# Altium footprint library imports.PcbLib: 1 footprints
Each footprint in its own frame and in the unit in brackets; x right, y up, seen from the top. Pads: shape width x height; smd on the part's side, far side on the other; paste and mask are expansions set on the pad; w line width, h text height; cw(c..) or ccw(c..) is an arc to the next point about the centre after c.
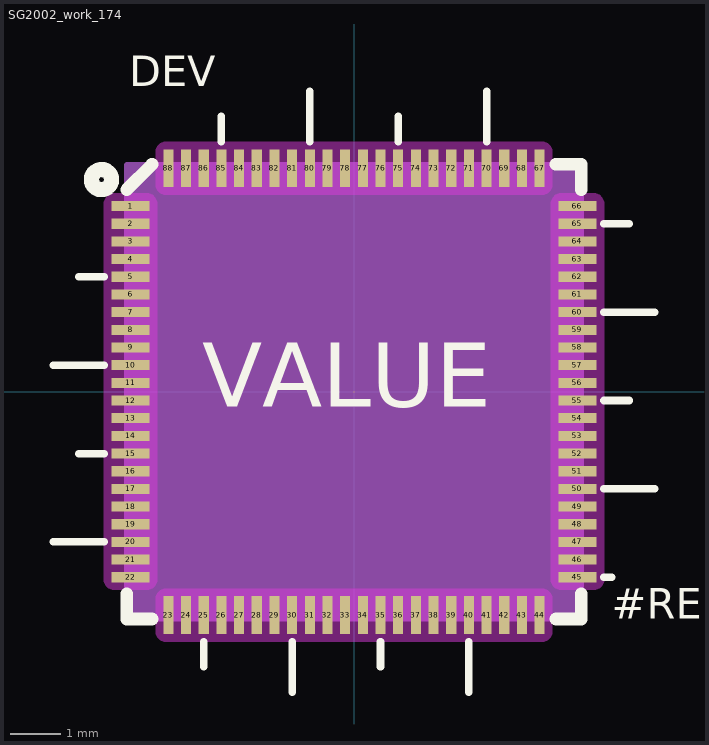
[diagram p0: the footprint, top view; thin cyan lines are the x and y axes]

## SG2002_work_174 [mm]
pads (89):
  rect 0.75x0.2 smd: 1(-4.425,3.675) 2(-4.425,3.325) 3(-4.425,2.975) 4(-4.425,2.625) 5(-4.425,2.275) 6(-4.425,1.925) 7(-4.425,1.575) 8(-4.425,1.225) 9(-4.425,0.875) 10(-4.425,0.525) 11(-4.425,0.175) 12(-4.425,-0.175) 13(-4.425,-0.525) 14(-4.425,-0.875) 15(-4.425,-1.225) 16(-4.425,-1.575) 17(-4.425,-1.925) 18(-4.425,-2.275) 19(-4.425,-2.625) 20(-4.425,-2.975) 21(-4.425,-3.325) 22(-4.425,-3.675) 45(4.425,-3.675) 46(4.425,-3.325) 47(4.425,-2.975) 48(4.425,-2.625) 49(4.425,-2.275) 50(4.425,-1.925) 51(4.425,-1.575) 52(4.425,-1.225) 53(4.425,-0.875) 54(4.425,-0.525) 55(4.425,-0.175) 56(4.425,0.175) 57(4.425,0.525) 58(4.425,0.875) 59(4.425,1.225) 60(4.425,1.575) 61(4.425,1.925) 62(4.425,2.275) 63(4.425,2.625) 64(4.425,2.975) 65(4.425,3.325) 66(4.425,3.675)
  rect 0.2x0.75 smd: 23(-3.675,-4.425) 24(-3.325,-4.425) 25(-2.975,-4.425) 26(-2.625,-4.425) 27(-2.275,-4.425) 28(-1.925,-4.425) 29(-1.575,-4.425) 30(-1.225,-4.425) 31(-0.875,-4.425) 32(-0.525,-4.425) 33(-0.175,-4.425) 34(0.175,-4.425) 35(0.525,-4.425) 36(0.875,-4.425) 37(1.225,-4.425) 38(1.575,-4.425) 39(1.925,-4.425) 40(2.275,-4.425) 41(2.625,-4.425) 42(2.975,-4.425) 43(3.325,-4.425) 44(3.675,-4.425) 67(3.675,4.425) 68(3.325,4.425) 69(2.975,4.425) 70(2.625,4.425) 71(2.275,4.425) 72(1.925,4.425) 73(1.575,4.425) 74(1.225,4.425) 75(0.875,4.425) 76(0.525,4.425) 77(0.175,4.425) 78(-0.175,4.425) 79(-0.525,4.425) 80(-0.875,4.425) 81(-1.225,4.425) 82(-1.575,4.425) 83(-1.925,4.425) 84(-2.275,4.425) 85(-2.625,4.425) 86(-2.975,4.425) 87(-3.325,4.425) 88(-3.675,4.425)
  rect 0x0 smd: 89(0,0)
TOP keep-out:
  region: 3.725,-4.95 3.765,-4.95 3.838,-4.92 3.895,-4.863 3.925,-4.79 3.925,-4.75 3.925,-4.1 3.925,-4.06 3.895,-3.987 3.838,-3.93 3.765,-3.9 3.725,-3.9 -3.725,-3.9 -3.765,-3.9 -3.838,-3.93 -3.895,-3.987 -3.925,-4.06 -3.925,-4.1 -3.925,-4.75 -3.925,-4.79 -3.895,-4.863 -3.838,-4.92 -3.765,-4.95 -3.725,-4.95
  region: -3.725,4.95 -3.765,4.95 -3.838,4.92 -3.895,4.863 -3.925,4.79 -3.925,4.75 -3.925,4.1 -3.925,4.06 -3.895,3.987 -3.838,3.93 -3.765,3.9 -3.725,3.9 3.725,3.9 3.765,3.9 3.838,3.93 3.895,3.987 3.925,4.06 3.925,4.1 3.925,4.75 3.925,4.79 3.895,4.863 3.838,4.92 3.765,4.95 3.725,4.95
  region: 4.95,3.725 4.95,3.765 4.92,3.838 4.863,3.895 4.79,3.925 4.75,3.925 4.1,3.925 4.06,3.925 3.987,3.895 3.93,3.838 3.9,3.765 3.9,3.725 3.9,-3.725 3.9,-3.765 3.93,-3.838 3.987,-3.895 4.06,-3.925 4.1,-3.925 4.75,-3.925 4.79,-3.925 4.863,-3.895 4.92,-3.838 4.95,-3.765 4.95,-3.725
  region: -4.95,-3.725 -4.95,-3.765 -4.92,-3.838 -4.863,-3.895 -4.79,-3.925 -4.75,-3.925 -4.1,-3.925 -4.06,-3.925 -3.987,-3.895 -3.93,-3.838 -3.9,-3.765 -3.9,-3.725 -3.9,3.725 -3.9,3.765 -3.93,3.838 -3.987,3.895 -4.06,3.925 -4.1,3.925 -4.75,3.925 -4.79,3.925 -4.863,3.895 -4.92,3.838 -4.95,3.765 -4.95,3.725
Top Overlay:
  circle w0.3: c-5,4.2 r0.2
  lines w0.15: -5.95,-2.975 -4.95,-2.975 ; -5.95,0.525 -4.95,0.525 ; -5.45,-1.225 -4.95,-1.225 ; -5.45,2.275 -4.95,2.275 ; -2.975,-5.45 -2.975,-4.95 ; -2.625,4.95 -2.625,5.45 ; -1.225,-5.95 -1.225,-4.95 ; -0.875,4.95 -0.875,5.95 ; 0.525,-5.45 0.525,-4.95 ; 0.875,4.95 0.875,5.45 ; 2.275,-5.95 2.275,-4.95 ; 2.625,4.95 2.625,5.95 ; 4.95,-3.675 5.1,-3.675 ; 4.95,-1.925 5.95,-1.925 ; 4.95,-0.175 5.45,-0.175 ; 4.95,1.575 5.95,1.575 ; 4.95,3.325 5.45,3.325
  lines w0.25: -4.5,-4 -4.5,-4.5 -4,-4.5 ; -4.5,4 -4,4.5 ; 4,-4.5 4.5,-4.5 4.5,-4 ; 4,4.5 4.5,4.5 4.5,4
  text "DEV" at -4.45,6.05 h0.6
  text "#REFDES" at 5.1,-4.5 h0.6
  text "VALUE" at -3,-0.3 h1.27
DFA_BOUND_TOP:
  dashed: -4.5,-4.5 4.5,-4.5 4.5,4.5 -4.5,4.5
PLACE_BOUND_TOP:
  region: -4.5,-4.5 4.5,-4.5 4.5,4.5 -4.5,4.5
DRAWING_ORIGIN:
  lines w0.025: -0.2,0 0.2,0 ; 0,-0.2 0,0.2
PIN_NUMBER:
  text "76" at 0.017,4.425 h0.64
  text "66" at 3.917,3.675 h0.64
  text "34" at -0.333,-4.425 h0.64
  text "45" at 3.917,-3.675 h0.64
  text "5" at -4.679,2.275 h0.64
  text "42" at 2.467,-4.425 h0.64
  text "10" at -4.933,0.525 h0.64
  text "36" at 0.367,-4.425 h0.64
  text "14" at -4.933,-0.875 h0.64
  text "64" at 3.917,2.975 h0.64
  text "7" at -4.679,1.575 h0.64
  text "48" at 3.917,-2.625 h0.64
  text "15" at -4.933,-1.225 h0.64
  text "30" at -1.733,-4.425 h0.64
  text "20" at -4.933,-2.975 h0.64
  text "40" at 1.767,-4.425 h0.64
  text "60" at 3.917,1.575 h0.64
  text "28" at -2.433,-4.425 h0.64
  text "25" at -3.483,-4.425 h0.64
  text "55" at 3.917,-0.175 h0.64
  text "68" at 2.817,4.425 h0.64
  text "39" at 1.417,-4.425 h0.64
  text "74" at 0.717,4.425 h0.64
  text "59" at 3.917,1.225 h0.64
  text "89" at -0.508,0 h0.64
  text "49" at 3.917,-2.275 h0.64
  text "63" at 3.917,2.625 h0.64
  text "32" at -1.033,-4.425 h0.64
  text "51" at 3.917,-1.575 h0.64
  text "56" at 3.917,0.175 h0.64
  text "33" at -0.683,-4.425 h0.64
  text "38" at 1.067,-4.425 h0.64
  text "82" at -2.083,4.425 h0.64
  text "13" at -4.933,-0.525 h0.64
  text "27" at -2.783,-4.425 h0.64
  text "50" at 3.917,-1.925 h0.64
  text "62" at 3.917,2.275 h0.64
  text "19" at -4.933,-2.625 h0.64
  text "54" at 3.917,-0.525 h0.64
  text "16" at -4.933,-1.575 h0.64
  text "87" at -3.833,4.425 h0.64
  text "85" at -3.133,4.425 h0.64
  text "12" at -4.933,-0.175 h0.64
  text "84" at -2.783,4.425 h0.64
  text "24" at -3.833,-4.425 h0.64
  text "83" at -2.433,4.425 h0.64
  text "35" at 0.017,-4.425 h0.64
  text "86" at -3.483,4.425 h0.64
  text "18" at -4.933,-2.275 h0.64
  text "6" at -4.679,1.925 h0.64
  text "2" at -4.679,3.325 h0.64
  text "69" at 2.467,4.425 h0.64
  text "26" at -3.133,-4.425 h0.64
  text "53" at 3.917,-0.875 h0.64
  text "23" at -4.183,-4.425 h0.64
  text "37" at 0.717,-4.425 h0.64
  text "70" at 2.117,4.425 h0.64
  text "31" at -1.383,-4.425 h0.64
  text "79" at -1.033,4.425 h0.64
  text "80" at -1.383,4.425 h0.64
  text "41" at 2.117,-4.425 h0.64
  text "67" at 3.167,4.425 h0.64
  text "29" at -2.083,-4.425 h0.64
  text "22" at -4.933,-3.675 h0.64
  text "44" at 3.167,-4.425 h0.64
  text "75" at 0.367,4.425 h0.64
  text "9" at -4.679,0.875 h0.64
  text "81" at -1.733,4.425 h0.64
  text "3" at -4.679,2.975 h0.64
  text "61" at 3.917,1.925 h0.64
  text "77" at -0.333,4.425 h0.64
  text "47" at 3.917,-2.975 h0.64
  text "8" at -4.679,1.225 h0.64
  text "11" at -4.933,0.175 h0.64
  text "52" at 3.917,-1.225 h0.64
  text "43" at 2.817,-4.425 h0.64
  text "58" at 3.917,0.875 h0.64
  text "71" at 1.767,4.425 h0.64
  text "57" at 3.917,0.525 h0.64
  text "21" at -4.933,-3.325 h0.64
  text "46" at 3.917,-3.325 h0.64
  text "72" at 1.417,4.425 h0.64
  text "65" at 3.917,3.325 h0.64
  text "88" at -4.183,4.425 h0.64
  text "78" at -0.683,4.425 h0.64
  text "1" at -4.679,3.675 h0.64
  text "17" at -4.933,-1.925 h0.64
  text "73" at 1.067,4.425 h0.64
  text "4" at -4.679,2.625 h0.64
ASSEMBLY_TOP:
  lines w0.1: -4.5,-4.5 -4.5,4.5 4.5,4.5 4.5,-4.5 -4.5,-4.5
3D body: height 3.81, standoff 0, extent -4.5,-4.5 4.5,4.5